# Altium footprint library ABP2DANT100PG2A3XX.PcbLib: 1 footprints
Each footprint in its own frame and in the unit in brackets; x right, y up, seen from the top. Pads: shape width x height; smd on the part's side, far side on the other; paste and mask are expansions set on the pad; w line width, h text height; cw(c..) or ccw(c..) is an arc to the next point about the centre after c.
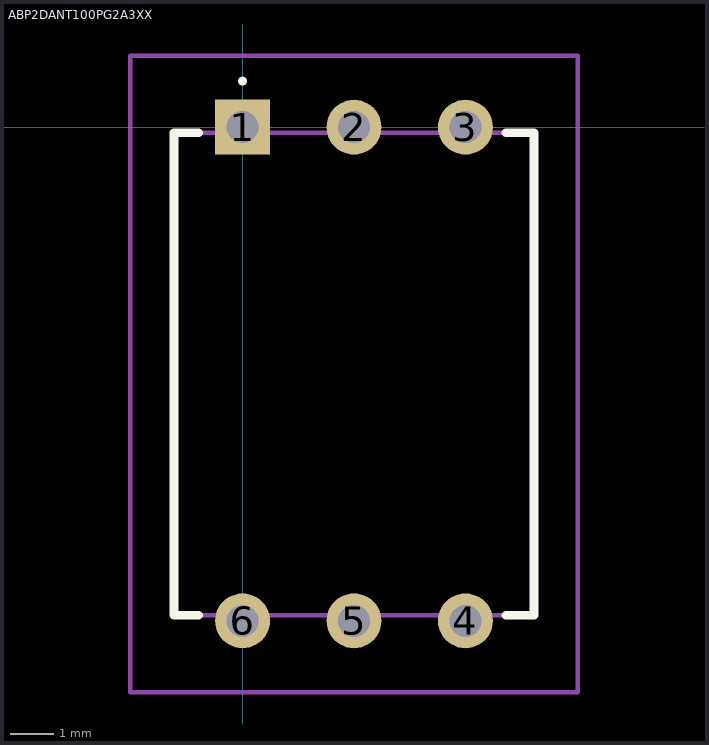
[diagram p0: the footprint, top view; thin cyan lines are the x and y axes]

## ABP2DANT100PG2A3XX [mm]
pads (6):
  rect 1.251x1.251 hole 0.73: 1(0,0)
  round 1.251 hole 0.73: 2(2.54,0) 3(5.08,0) 4(5.08,-11.25) 5(2.54,-11.25) 6(0,-11.25)
Top Overlay:
  lines w0.1: 0,1 0,1 ; 0,1 ccw(c0,1.05) 0,1.1 ; 0,1 cw(c0,1.05) 0,1.1 ; 0,1.1 0,1.1
  lines w0.2: -1,-11.125 -1.56,-11.125 -1.56,-0.125 -1,-0.125 ; 6,-11.125 6.64,-11.125 6.64,-0.125 6,-0.125
Mechanical 15:
  lines w0.1: -1.56,-11.125 6.64,-11.125 6.64,-0.125 -1.56,-0.125 -1.56,-11.125
Mechanical 20:
  lines w0.1: -2.56,-12.876 7.64,-12.876 7.64,1.626 -2.56,1.626 -2.56,-12.876